# Altium schematic symbol library lm3880mf-1ac-nopb.SchLib: 1 symbol
Pins are listed as number, name and electrical type; pins without a type are passive.

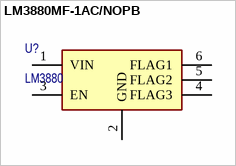
[diagram p0: symbol LM3880MF-1AC/NOPB]

## LM3880MF-1AC/NOPB
designator U?, comment LM3880
IC PWR SUPPLY SEQUENCER SOT23-6 / Processor Supervisor 1.25V 3 Open Drain 6-Pin SOT-23 T/R; Manufacturer: Texas Instruments; Manufacturer Part Number: LM3880MF-1AC/NOPB; Manufacturer Lifecycle Status: ACTIVE; Max Supply Voltage: 5.5V; Min Supply Voltage: 2.7V; Number of Voltages Monitored: 3; Operating Supply Current: 25µA; Watchdog Timer: No; Supplier: Arrow Electronics; Supplier Part Number: LM3880MF-1AC/NOPB; RoHS: Compliant; Category: Voltage Supervisors; Stock: 537; Pricing: 1=1.5615, 10=1.1749, 25=1.0635, 100=0.946, 250=0.8852, 500=0.8456 (USD); Case/Package: SOT-23; Height: 0m; Lead Free: Lead Free; Length: 2.9mm; Lifecycle Status: Production; Max Operating Temperature: 125°C; Min Operating Temperature: -40°C; Mounting Technology: Surface Mount; Pins: 6; Packaging: Tape & Reel; Quiescent Current: 25µA; Radiation Hardening: No; Schedule B: 8542390000, 8542390000|8542390000|8542390000|8542390000|8542390000; Thickness: 1.2mm; Width: 1.6mm; ComponentLink1URL: https://sigma.octopart.com:443/182282880/technical_drawing/Texas-Instruments-LM3880MF-1AC-NOPB.pdf?src-supplier=Texas+Instruments; ComponentLink1Description: https://sigma.octopart.com:443/182282880/technical_drawing/Texas-Instruments-LM3880MF-1AC-NOPB.pdf?src-supplier=Texas+Instruments; ComponentLink2URL: https://octopart.com:443/opatz8j6/c1?t=T-T_KtU4UycLIr3Mx3JigtdcRKIzezu7UGxY7mlAos9z-LalYXhUUDhfcvS8jjuUYlxgIXCmTuDrBXPp-C6id52hISY0N9oSfpaQSoB8ALl2S3BDOnCgxm62CasA7RH-Ol4tAy5JP9OIGzKKdbw776FbB3tgvpOD_bbEIeBlIp20WxvXwXsSzqgMfIsGJLJUZk6TTpfiOciXOXNwWjgJiQn-yKK33JkcQ0l2GoDAZaZ-9u9ItCZIUnW5GiRsNZpZGW__pjZRVArZWJPzboqO3PxqQMfDUDlQ6Sgadi2YAkvwCcsun5YmrYLARY-_XEe-6KbrUJO0asSpEIkpOqxKJG9_C3HNtP13ryy34NGbRQx4WDx9dzYyiaEQJfVtfb6S2_M_VQ&src-supplier=Texas+Instruments; ComponentLink2Description: https://octopart.com:443/opatz8j6/c1?t=T-T_KtU4UycLIr3Mx3JigtdcRKIzezu7UGxY7mlAos9z-LalYXhUUDhfcvS8jjuUYlxgIXCmTuDrBXPp-C6id52hISY0N9oSfpaQSoB8ALl2S3BDOnCgxm62CasA7RH-Ol4tAy5JP9OIGzKKdbw776FbB3tgvpOD_bbEIeBlIp20WxvXwXsSzqgMfIsGJLJUZk6TTpfiOciXOXNwWjgJiQn-yKK33JkcQ0l2GoDAZaZ-9u9ItCZIUnW5GiRsNZpZGW__pjZRVArZWJPzboqO3PxqQMfDUDlQ6Sgadi2YAkvwCcsun5YmrYLARY-_XEe-6KbrUJO0asSpEIkpOqxKJG9_C3HNtP13ryy34NGbRQx4WDx9dzYyiaEQJfVtfb6S2_M_VQ&src-supplier=Texas+Instruments; ComponentLink3URL: https://sigma.octopart.com:443/179253514/technical_drawing/Texas-Instruments-LM3880MF-1AC-NOPB.pdf?src-supplier=Texas+Instruments; ComponentLink3Description: https://sigma.octopart.com:443/179253514/technical_drawing/Texas-Instruments-LM3880MF-1AC-NOPB.pdf?src-supplier=Texas+Instruments; ComponentLink4URL: https://sigma.octopart.com:443/177332312/technical_drawing/Texas-Instruments-LM3880MF-1AC-NOPB.pdf?src-supplier=Texas+Instruments; ComponentLink4Description: https://sigma.octopart.com:443/177332312/technical_drawing/Texas-Instruments-LM3880MF-1AC-NOPB.pdf?src-supplier=Texas+Instruments; ComponentLink5URL: https://sigma.octopart.com:443/175570407/technical_drawing/Texas-Instruments-LM3880MF-1AC-NOPB.pdf?src-supplier=Texas+Instruments; ComponentLink5Description: https://sigma.octopart.com:443/175570407/technical_drawing/Texas-Instruments-LM3880MF-1AC-NOPB.pdf?src-supplier=Texas+Instruments; ComponentLink6URL: https://sigma.octopart.com:443/154719501/technical_drawing/Texas-Instruments-LM3880MF-1AC-NOPB.pdf?src-supplier=Texas+Instruments; ComponentLink6Description: https://sigma.octopart.com:443/154719501/technical_drawing/Texas-Instruments-LM3880MF-1AC-NOPB.pdf?src-supplier=Texas+Instruments; ComponentLink7URL: https://datasheet.octopart.com:443/LM3880MF-1AC-NOPB-Texas-Instruments-datasheet-37715656.pdf?src-supplier=Texas+Instruments; ComponentLink7Description: https://datasheet.octopart.com:443/LM3880MF-1AC-NOPB-Texas-Instruments-datasheet-37715656.pdf?src-supplier=Texas+Instruments; ComponentLink8URL: https://sigma.octopart.com:443/49249327/technical_drawing/Texas-Instruments-LM3880MF-1AC-NOPB.pdf?src-supplier=Texas+Instruments; ComponentLink8Description: https://sigma.octopart.com:443/49249327/technical_drawing/Texas-Instruments-LM3880MF-1AC-NOPB.pdf?src-supplier=Texas+Instruments; ComponentLink9URL: https://datasheet.octopart.com:443/LM3880MF-1AC-NOPB-Texas-Instruments-datasheet-34150822.pdf?src-supplier=Texas+Instruments; ComponentLink9Description: https://datasheet.octopart.com:443/LM3880MF-1AC-NOPB-Texas-Instruments-datasheet-34150822.pdf?src-supplier=Texas+Instruments; ComponentLink10URL: https://datasheet.octopart.com:443/LM3880MF-1AC-NOPB-Texas-Instruments-datasheet-14540335.pdf?src-supplier=Texas+Instruments; ComponentLink10Description: https://datasheet.octopart.com:443/LM3880MF-1AC-NOPB-Texas-Instruments-datasheet-14540335.pdf?src-supplier=Texas+Instruments; ComponentLink11URL: https://datasheet.octopart.com:443/LM3880MF-1AC/NOPB-Texas-Instruments-datasheet-10844415.pdf?src-supplier=Future+Electronics; ComponentLink11Description: https://datasheet.octopart.com:443/LM3880MF-1AC/NOPB-Texas-Instruments-datasheet-10844415.pdf?src-supplier=Future+Electronics; ComponentLink12URL: https://datasheet.octopart.com:443/LM3880MF-1AC/NOPB-National-Semiconductor-datasheet-519428.pdf?src-supplier=Arrow+Electronics; ComponentLink12Description: https://datasheet.octopart.com:443/LM3880MF-1AC/NOPB-National-Semiconductor-datasheet-519428.pdf?src-supplier=Arrow+Electronics; ComponentLink13URL: https://datasheet.octopart.com:443/LM3880MF-1AC-NOPB-Texas-Instruments-datasheet-165804070.pdf?src-supplier=LCSC; ComponentLink13Description: https://datasheet.octopart.com:443/LM3880MF-1AC-NOPB-Texas-Instruments-datasheet-165804070.pdf?src-supplier=LCSC; ComponentLink14URL: https://datasheet.octopart.com:443/LM3880MF-1AC-NOPB-Texas-Instruments-datasheet-159115207.pdf?src-supplier=LCSC; ComponentLink14Description: https://datasheet.octopart.com:443/LM3880MF-1AC-NOPB-Texas-Instruments-datasheet-159115207.pdf?src-supplier=LCSC; ComponentLink15URL: https://datasheet.octopart.com:443/LM3880MF-1AC-NOPB-Texas-Instruments-datasheet-164415080.pdf?src-supplier=SHENGYU+ELECTRONICS; ComponentLink15Description: https://datasheet.octopart.com:443/LM3880MF-1AC-NOPB-Texas-Instruments-datasheet-164415080.pdf?src-supplier=SHENGYU+ELECTRONICS; ComponentLink16URL: https://datasheet.octopart.com:443/LM3880MF-1AC/NOPB-National-Semiconductor-datasheet-9570216.pdf?src-supplier=RS+(Formerly+Allied+Electronics); ComponentLink16Description: https://datasheet.octopart.com:443/LM3880MF-1AC/NOPB-National-Semiconductor-datasheet-9570216.pdf?src-supplier=RS+(Formerly+Allied+Electronics); ComponentLink17URL: https://datasheet.octopart.com:443/LM3880MF-1AC/NOPB-National-Semiconductor-datasheet-148058.pdf?src-supplier=DigiKey; ComponentLink17Description: https://datasheet.octopart.com:443/LM3880MF-1AC/NOPB-National-Semiconductor-datasheet-148058.pdf?src-supplier=DigiKey; ComponentLink18URL: http://sigma.octopart.com:80/reach_statement/Texas-Instruments-company-64.pdf?src-supplier=Compliance+Statements; ComponentLink18Description: http://sigma.octopart.com:80/reach_statement/Texas-Instruments-company-64.pdf?src-supplier=Compliance+Statements; ComponentLink19URL: http://sigma.octopart.com:80/conflict_mineral_statement/Texas-Instruments-company-63.pdf?src-supplier=Compliance+Statements; ComponentLink19Description: http://sigma.octopart.com:80/conflict_mineral_statement/Texas-Instruments-company-63.pdf?src-supplier=Compliance+Statements
footprint sot-23-6-p0.95 (SOT23, 6-Leads, Body 2.90x2.80mm, Pitch 0.95mm, IPC Medium Density)
pins: 1 VIN, 2 GND, 3 EN, 4 FLAG3, 5 FLAG2, 6 FLAG1